# Altium schematic symbol library Centralize.SchLib: 1081 symbols (part 2 of 26)
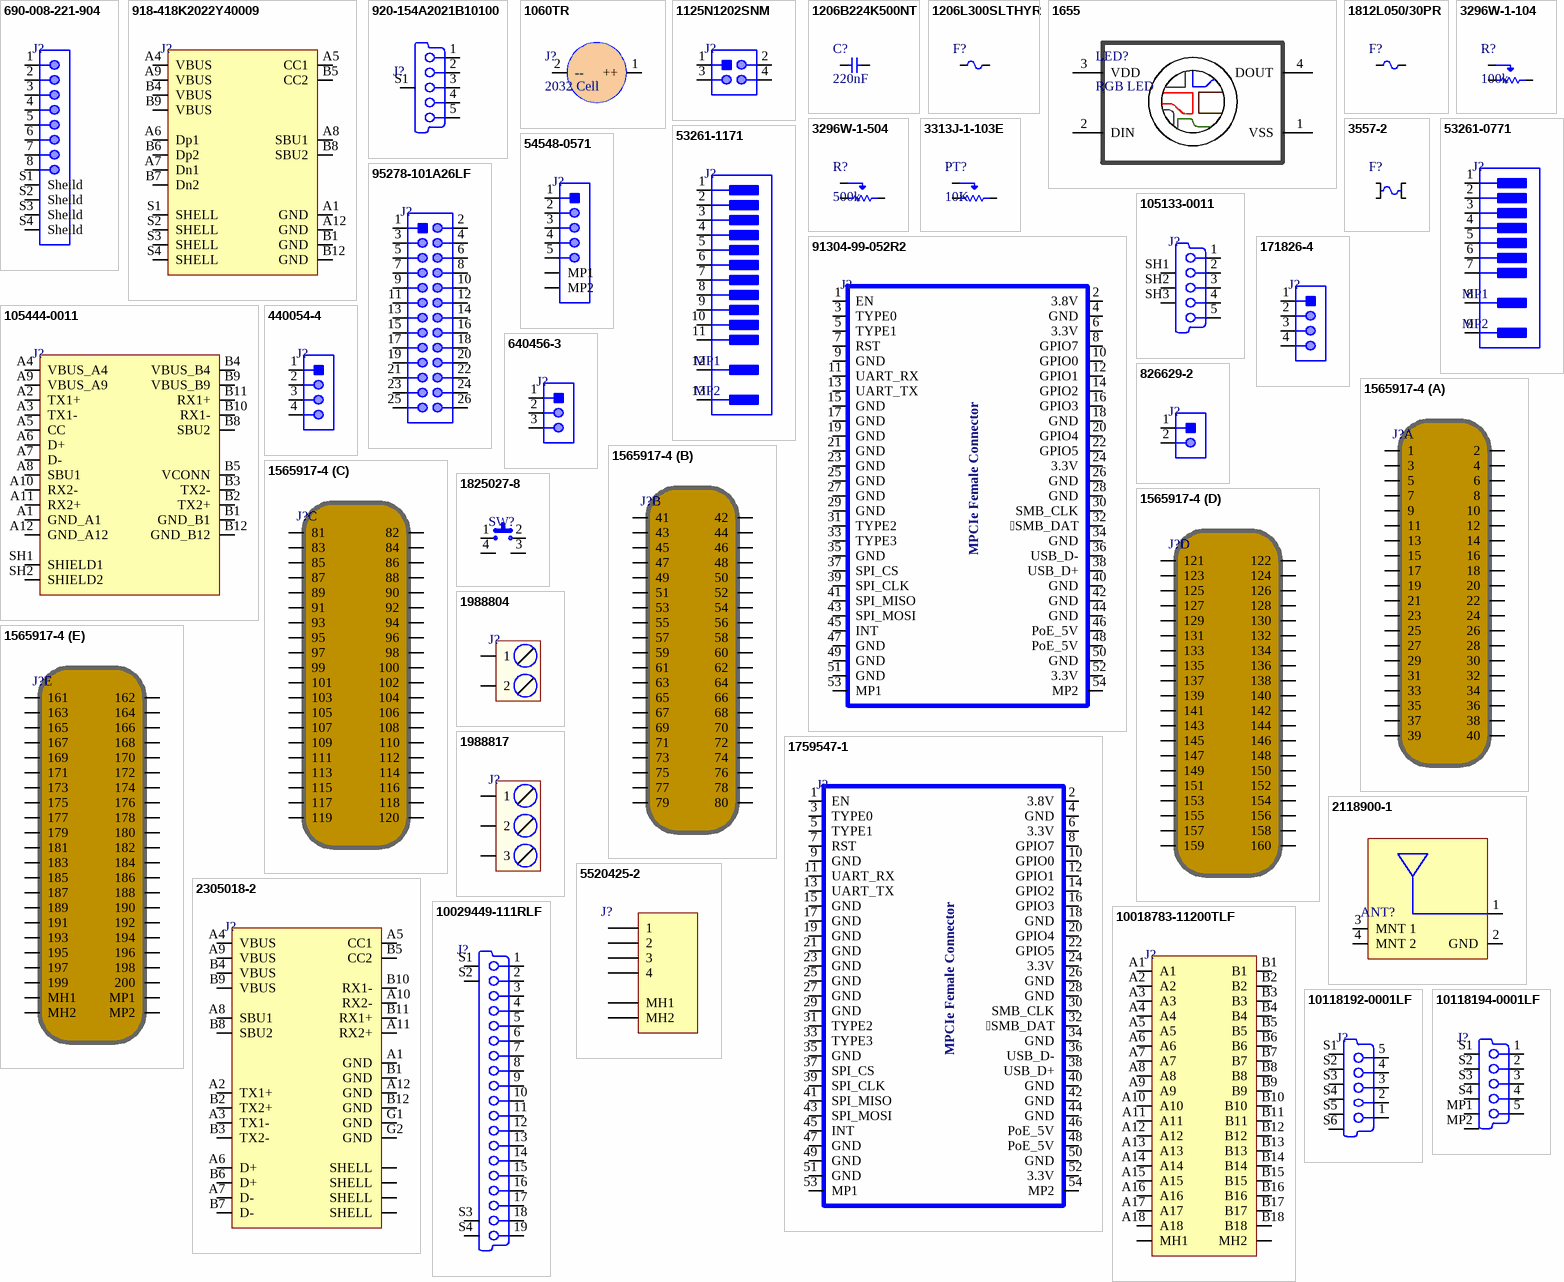
[diagram p48: symbols 690-008-221-904 to 10118194-0001LF]

## 105133-0011
designator J?
CONN RCPT USB2.0 MICRO B SMD; Manufacturer: Molex; Manufacturer Part Number: 105133-0011; Connector Type: TELECOM AND DATACOM CONNECTOR; Option: General Purpose; Contact Resistance: 30mR; Contact Style: USB; Dielectric Withstanding Voltage (AC): 140V; Durability: 10000Cycles; Empty Shell: No; Insulation Resistance: 1GR; Number Of Connectors: 1; PCB Contact Pattern: RECTANGULAR; Polarization Key: POLARIZED HOUSING; Rated Current (Signal): 1A; Number of Contacts: 5; Body Breadth: 0.118inch; Body Depth: 0.264inch; Body Length: 0.315inch; Mounting Option 1: LOCKING; Reference Standard: UL; Reliability: COMMERCIAL; Item Type: USB B Connector; Supplier 1: Avnet; RoHS: Yes; Category: USB Connectors; Stock 1: 12800; Pricing 1: 500=1.01170 (USD); Mounting Technology: Board; Contact Material: Copper Alloy; Contact Finish - Mating: NOT SPECIFIED; Contact Finish - Termination: Gold (Au) - with Nickel (Ni) barrier; Insulation Material: Polyethylene; Shell Finish: Tin; Shell Material: Stainless Steel; Min Operating Temperature: -30°C; Max Operating Temperature: 85°C; JESD-609 Code: e4; Contact Gender: Female; Filter Feature: No; Mixed Contacts: No; Mounting Style: STRAIGHT; Number Of PCB Rows: 1; Termination: SMD/SMT; Terminal Pitch: 0.6604mm; Flammability Rating: UL94 V-0; Reach SVHC Compliant: Yes; RoHS Compliant: Yes; DIN Conformance: No; IEC Conformance: No; MIL Conformance: No; ComponentLink1URL: https://datasheet.ciiva.com:443/pdfs/VipMasterIC/IC/MOLE/MOLE-S-A0000025294/MOLE-S-A0000025294-1.pdf?src-supplier=IHS+Markit; ComponentLink1Description: https://datasheet.ciiva.com:443/pdfs/VipMasterIC/IC/MOLE/MOLE-S-A0000025294/MOLE-S-A0000025294-1.pdf?src-supplier=IHS+Markit; ComponentLink2URL: https://datasheet.ciiva.com/29660/1051330011-sd-29660273.pdf?src-supplier=Digi-Key; ComponentLink2Description: https://datasheet.ciiva.com/29660/1051330011-sd-29660273.pdf?src-supplier=Digi-Key; ComponentLink3URL: https://datasheet.ciiva.com/15181/getdatasheetpartid-719072-15181485.pdf?src-supplier=Verical; ComponentLink3Description: https://datasheet.ciiva.com/15181/getdatasheetpartid-719072-15181485.pdf?src-supplier=Verical; Supplier Part Number 1: 105133-0011; LCSC Part Number: C586226
footprint 1051330011
pins: 1 V BUS (5V) "USB Vcc [Red]", 2 D- "USB Data - [White]", 3 D+ "USB Data + [Green]", 4 ID, 5 GND "Ground [Black]", SH1 "Shell", SH2 "Shell", SH3 "Shell"

## 105444-0011
designator J?
CONN PLUG USB3.1 TYPEC BRD EDGE; Manufacturer: Molex; Manufacturer Part Number: 105444-0011; Item Type: Type-C Connector; Supplier: Mouser; Supplier Part Number: 538-105444-0011; RoHS: Yes; Category: USB Connectors; Stock: 9840; Pricing: 1=2.88, 10=2.46, 50=2.46, 100=2.07, 1000=1.69, 10000=1.55 (USD); ComponentLink1URL: http://www.molex.com/pdm_docs/sd/1054440011_sd.pdf?src-supplier=Digi-Key; ComponentLink1Description: http://www.molex.com/pdm_docs/sd/1054440011_sd.pdf?src-supplier=Digi-Key; LCSC Part Number: C561769
footprint 1054440011
pins: A1 GND_A1, A2 TX1+, A3 TX1-, A4 VBUS_A4, A5 CC, A6 D+, A7 D-, A8 SBU1, A9 VBUS_A9, A10 RX2-, A11 RX2+, A12 GND_A12, B1 GND_B1, B2 TX2+, B3 TX2-, B4 VBUS_B4, B5 VCONN, B8 SBU2, B9 VBUS_B9, B10 RX1-, B11 RX1+, B12 GND_B12, SH1 SHIELD1, SH2 SHIELD2

## 171826-4
designator J?
CONN HEADER R/A 4POS 2.5MM; Manufacturer: TE Connectivity; Manufacturer Part Number: 171826-4; Number of Contacts: 4; Connector Type: Plug,Header,Pin; PCB Mount Retention: Without; PCB Mounting Orientation: Horizontal; Backwall/Post Interruptions: No (Without); Mating Alignment: Yes (With); Contact Current Rating: 3.5A; Plating Thickness: 0.8um; PCB Thickness: 0.063inch; Tail Length: 0.142inch; Approvals: UL; Item Type: R/A Header; Supplier 1: Digi-Key; Stock 1: 8314; Pricing 1: 1=0.65, 10=0.605, 100=0.4642, 500=0.40362, 1000=0.33298, 5000=0.29262, 10000=0.27244 (USD); Mount: Through Hole; Contact Plating: Copper,Tin; Contact Material: Brass; Color: Natural; Housing Color: Natural; Housing Material: Nylon; Contact Shape: Square; Insulation Material: Polyamide; Min Operating Temperature: -20°C; Max Operating Temperature: 95°C; Number of Rows: 1; Termination: Solder; Packaging: Bag; Package Quantity: 500; Number of Positions: 4; Orientation: Right Angle; Series: EI; Contact Type: Male Pin; Contact Retention: No (Without); Mating Retention: Yes (With); PCB Mount Alignment: No (Without); Strain Relief: No (Without); Contact Gender: Male; Current Rating: 3.5A; Length: 10mm; Width: 13.5mm; Height: 0.264inch; Pitch: 2.5mm; Contact Mating Length: 7.5mm; Depth: 13.5mm; Lead Pitch: 2.5mm; Radiation Hardening: No; Flammability Rating: UL94 V-0; RoHS Compliant: Yes; REACH SVHC: No SVHC; ComponentLink1URL: http://www.farnell.com/datasheets/1322337.pdf?src-supplier=Element14; ComponentLink1Description: http://www.farnell.com/datasheets/1322337.pdf?src-supplier=Element14; ComponentLink2URL: http://www.te.com/commerce/DocumentDelivery/DDEController?Action=srchrtrv&DocNm=171826&DocType=Customer+Drawing&DocLang=English&src-supplier=Digi-Key; ComponentLink2Description: http://www.te.com/commerce/DocumentDelivery/DDEController?Action=srchrtrv&DocNm=171826&DocType=Customer+Drawing&DocLang=English&src-supplier=Digi-Key; ComponentLink3URL: http://www.onlinecomponents.com/productFiles/mf-AMP/eng_cat_1242174_0698_10_.pdf?src-supplier=Onlinecomponents.com; ComponentLink3Description: http://www.onlinecomponents.com/productFiles/mf-AMP/eng_cat_1242174_0698_10_.pdf?src-supplier=Onlinecomponents.com; ComponentLink4URL: http://uk.rs-online.com/webdocs/0d92/0900766b80d92f49.pdf?src-supplier=RSComponents; ComponentLink4Description: http://uk.rs-online.com/webdocs/0d92/0900766b80d92f49.pdf?src-supplier=RSComponents; ComponentLink5URL: http://www.jameco.com/Jameco/Products/ProdDS/742320.pdf?src-supplier=Jameco; ComponentLink5Description: http://www.jameco.com/Jameco/Products/ProdDS/742320.pdf?src-supplier=Jameco; Supplier Part Number 1: A112643-ND; LCSC Part Number: C590635
footprint 171826-4_
pins: 1, 2, 3, 4

## 440054-4
designator J?
CONN HEADER VERT 4POS 2MM; Manufacturer: TE Connectivity; Manufacturer Part Number: 440054-4; Item Type: JST Connector; Supplier 1: Rs; RoHS: Yes; Category: Headers and Wire Housings; Stock 1: 3450; Pricing 1: 10=0.02240 (GBP); ComponentLink1URL: https://datasheet.ciiva.com/30492/0900766b80f980a5-30492744.pdf?src-supplier=Rs; ComponentLink1Description: https://datasheet.ciiva.com/30492/0900766b80f980a5-30492744.pdf?src-supplier=Rs; ComponentLink2URL: https://datasheet.ciiva.com/34397/4400544-34397340.pdf?src-supplier=Onlinecomponents.com; ComponentLink2Description: https://datasheet.ciiva.com/34397/4400544-34397340.pdf?src-supplier=Onlinecomponents.com; ComponentLink3URL: https://datasheet.ciiva.com/732/eng-cd-440054-e2-732490.pdf?src-supplier=Digi-Key; ComponentLink3Description: https://datasheet.ciiva.com/732/eng-cd-440054-e2-732490.pdf?src-supplier=Digi-Key; Supplier Part Number 1: 7202004P; LCSC Part Number: C574333
footprint 440054-4
pins: 1, 2, 3, 4

## 640456-3
designator J?
CONN HEADER VERT 3POS 2.54MM; Manufacturer: TE Connectivity; Manufacturer Part Number: 640456-3; Number of Positions: 3; Voltage Rating: 250V; Connector Type: Connector,Pin,Plug,Header; Connector System: Wire-to-Board; Contact Retention: No (Without); Contact Current Rating: 5A; PCB Mount Retention: Without; Contact Resistance: 6mR; PCB Mounting Orientation: Vertical; Gender: Male; Contact Style: Straight; Circuit Application: Signal; Mating Connector Lock: Yes (With); PCB Thickness: 0.063inch; Plating Thickness: 3.81um; Contact Post Length: 3.56mm; Tail Length: 0.14inch; Approvals: CSA; Supplier 1: RSComponents; RoHS: Yes; Category: JST Connectors; Stock 1: 8977; Pricing 1: 250=0.08100, 1000=0.07000, 5000=0.05800, 10000=0.05400 (GBP); Mount: Through Hole; Contact Plating: Tin; Housing Color: Natural; Housing Material: Polyester; Contact Material: Copper Alloy; Color: Beige,White; Contact Shape: Square; Contact Finish - Mating: TIN; Insulation Material: Thermoplastic; Insulation Color: Natural; Min Operating Temperature: -67°C; Max Operating Temperature: 221°C; Number of Rows: 1; Packaging: Bulk; Package Quantity: 5000; Termination: Solder; Number of Contacts: 3; Orientation: Straight; Max Voltage Rating (AC): 250V; Contact Gender: Male; Mating Alignment: No (Without); Mating Retention: No (Without); PCB Mount Alignment: No (Without); Sealable: No (Without); Current Rating: 5A; Strain Relief: No (Without); Backwall/Post Interruptions: No (Without); Shrouded: No (Without); Fastening Type: Friction; Voltage Rating (AC): 250V; Series: MTA-100; Contact Type: Male Pin; Panel Mount Retention: No (Without); Mounting Ears: No (Without); Length: 0.4inch; Height: 7.87mm; Pitch: 2.54mm; Depth: 5.72mm; Contact Mating Length: 7.49mm; Radiation Hardening: No; Flammability Rating: UL94 V-0; REACH SVHC: Unknown; Lead Free: Lead Free; ELV: Compliant; RoHS Compliant: Yes; ComponentLink1URL: https://datasheet.ciiva.com/11746/0900766b80027008-11746172.pdf?src-supplier=RSComponents; ComponentLink1Description: https://datasheet.ciiva.com/11746/0900766b80027008-11746172.pdf?src-supplier=RSComponents; ComponentLink2URL: https://datasheet.ciiva.com/6005/1712135-6005440.pdf?src-supplier=Farnell; ComponentLink2Description: https://datasheet.ciiva.com/6005/1712135-6005440.pdf?src-supplier=Farnell; ComponentLink3URL: https://datasheet.ciiva.com/19474/613940-19474164.pdf?src-supplier=Jameco; ComponentLink3Description: https://datasheet.ciiva.com/19474/613940-19474164.pdf?src-supplier=Jameco; ComponentLink4URL: https://datasheet.ciiva.com/16456/eng-ds-82056-mta-0608-16456886.pdf?src-supplier=Future+Electronics; ComponentLink4Description: https://datasheet.ciiva.com/16456/eng-ds-82056-mta-0608-16456886.pdf?src-supplier=Future+Electronics; ComponentLink5URL: https://datasheet.ciiva.com/14156/04384301-14156821.pdf?src-supplier=Distrelec; ComponentLink5Description: https://datasheet.ciiva.com/14156/04384301-14156821.pdf?src-supplier=Distrelec; ComponentLink6URL: https://datasheet.ciiva.com/16656/eng-ds-82056-mta-0608-16656523.pdf?src-supplier=Avnet+Europe; ComponentLink6Description: https://datasheet.ciiva.com/16656/eng-ds-82056-mta-0608-16656523.pdf?src-supplier=Avnet+Europe; ComponentLink7URL: https://datasheet.ciiva.com/30127/8852eng-ds-82056-mta-0608-30127480.pdf?src-supplier=Onlinecomponents.com; ComponentLink7Description: https://datasheet.ciiva.com/30127/8852eng-ds-82056-mta-0608-30127480.pdf?src-supplier=Onlinecomponents.com; ComponentLink8URL: https://datasheet.ciiva.com/14637/70083643-14637750.pdf?src-supplier=Allied+Electronics; ComponentLink8Description: https://datasheet.ciiva.com/14637/70083643-14637750.pdf?src-supplier=Allied+Electronics; ComponentLink9URL: https://datasheet.ciiva.com/7128/eng-ds-82056-mta-0608-7128744.pdf?src-supplier=Newark; ComponentLink9Description: https://datasheet.ciiva.com/7128/eng-ds-82056-mta-0608-7128744.pdf?src-supplier=Newark; ComponentLink10URL: https://datasheet.ciiva.com/709/eng-cd-640456-w2-709688.pdf?src-supplier=Digi-Key; ComponentLink10Description: https://datasheet.ciiva.com/709/eng-cd-640456-w2-709688.pdf?src-supplier=Digi-Key; Supplier Part Number 1: 1320361P; LCSC Part Number: C86503; Item Type: Header
footprint 640456-3_
pins: 1, 2, 3

## 826629-2
designator J?
CONN HEADER VERT 2POS 2.54MM; Manufacturer: TE Connectivity; Manufacturer Part Number: 8266292; Number of Contacts: 2; Connector Type: Plug,Header,Pin; Current Rating: 3A; Board Standoff: No (Without); High Speed Serial Data Connector: No; PCB Mount Retention: Without; Gender: Male; PCB Mounting Orientation: Vertical; Contact Post Length: 0.1259inch; Plating Thickness: 0.8um; Item Type: Male Header; Supplier 1: RSComponents; RoHS: Yes; Category: Board to Board Connectors; Mount: Straddle Mount; Contact Plating: Gold,Tin; Contact Material: Bronze; Color: Green; Housing Color: Green; Housing Material: PBT; Contact Shape: Square; Min Operating Temperature: -65°C; Max Operating Temperature: 105°C; Number of Rows: 1; Termination: Through Hole; Number of Positions: 2; Packaging: Carton; Package Quantity: 3000; Series: AMPMODU MOD II; Contact Type: Male Pin; Contact Gender: Male; Orientation: Straight; Contact Protection: No (Without); Gasket: No (Without); High Temperature Housing: No; Keyed: No; Mating Alignment: No (Without); Mating Connector Lock: No (Without); Selectively Loaded: No (Without); Stabilizers: No (Without); Strain Relief: No (Without); Length: 5.08mm; Pitch: 2.54mm; Contact Mating Length: 6.7mm; Row Spacing: 2.54mm; Depth: 2.5mm; Radiation Hardening: No; Flammability Rating: UL94 V-0; REACH SVHC: No SVHC; ELV: Compliant; Lead Free: Lead Free; ComponentLink1URL: https://datasheet.ciiva.com/11746/0900766b80d7c358-11746248.pdf?src-supplier=RSComponents; ComponentLink1Description: https://datasheet.ciiva.com/11746/0900766b80d7c358-11746248.pdf?src-supplier=RSComponents; ComponentLink2URL: https://datasheet.ciiva.com/30224/8266292-30224019.pdf?src-supplier=Onlinecomponents.com; ComponentLink2Description: https://datasheet.ciiva.com/30224/8266292-30224019.pdf?src-supplier=Onlinecomponents.com; ComponentLink3URL: https://datasheet.ciiva.com/29369/001094754-da-01-en-stiftleiste-1-reihig-0-0826629-2-29369600.pdf?src-supplier=Conrad; ComponentLink3Description: https://datasheet.ciiva.com/29369/001094754-da-01-en-stiftleiste-1-reihig-0-0826629-2-29369600.pdf?src-supplier=Conrad; ComponentLink4URL: https://datasheet.ciiva.com/6857/eng-cd-826629-aa-basefilename-6857135.pdf?src-supplier=Digi-Key; ComponentLink4Description: https://datasheet.ciiva.com/6857/eng-cd-826629-aa-basefilename-6857135.pdf?src-supplier=Digi-Key; ComponentLink5URL: https://datasheet.ciiva.com/14120/eh826629-draw-14120837.pdf?src-supplier=Distrelec; ComponentLink5Description: https://datasheet.ciiva.com/14120/eh826629-draw-14120837.pdf?src-supplier=Distrelec; Supplier Part Number 1: 1361864; LCSC Part Number: C86471
footprint HDR1X2_ (CONN HEADER VERT 2POS 2.54MM)
pins: 1, 2

## 1565917-4
designator J?
CONN SKT SODIMM 200POS R/A SMD; Manufacturer: TE Connectivity; Manufacturer Part Number: 1565917-4; Number of Contacts: 200; Memory Type: DDR2 SDRAM; PCB Mount Retention: With; Voltage Rating: 1.8V; Contact Current Rating: 500mA; Circuit Application: Power; Connector System: Cable-to-Board; Sealable: No (Without); Connector Type: Socket; Pitch: 0.6mm; Row Spacing: 0.244inch; Stack Height: 5.2mm; Item Type: SODIMM Connector; Supplier 1: Digi-Key; RoHS: Yes; Category: Memory Connectors; Stock 1: 14675; Pricing 1: 1=6.10000, 10=5.84400, 25=5.33600, 50=5.08180 (USD); Mount: Surface Mount; Number of Pins: 200; Housing Color: Black; Insulation Material: Thermoplastic; Housing Material: Thermoplastic; Contact Material: Copper Alloy; Contact Plating: Gold; Min Operating Temperature: -67°C; Max Operating Temperature: 185°C; Termination: Solder; Number of Rows: 2; Orientation: Right Angle; Number of Positions: 200; Packaging: Tape and Reel; Package Quantity: 150; Radiation Hardening: No; ELV: Compliant; Flammability Rating: UL94 V-0; REACH SVHC: Unknown; Lead Free: Lead Free; ComponentLink1URL: https://datasheet.ciiva.com/1106/1605472-1106736.pdf?src-supplier=Newark; ComponentLink1Description: https://datasheet.ciiva.com/1106/1605472-1106736.pdf?src-supplier=Newark; ComponentLink2URL: https://datasheet.ciiva.com/682/eng-cd-1565917-d2-682628.pdf?src-supplier=Digi-Key; ComponentLink2Description: https://datasheet.ciiva.com/682/eng-cd-1565917-d2-682628.pdf?src-supplier=Digi-Key; ComponentLink3URL: https://datasheet.ciiva.com/16314/1565917-4-16314005.pdf?src-supplier=Future+Electronics; ComponentLink3Description: https://datasheet.ciiva.com/16314/1565917-4-16314005.pdf?src-supplier=Future+Electronics; ComponentLink4URL: https://datasheet.ciiva.com/30082/a15659174317-30082398.pdf?src-supplier=Onlinecomponents.com; ComponentLink4Description: https://datasheet.ciiva.com/30082/a15659174317-30082398.pdf?src-supplier=Onlinecomponents.com; Supplier Part Number 1: A97498CT-ND
footprint 1565917-4_
part A pins: 1, 2, 3, 4, 5, 6, 7, 8, 9, 10, 11, 12, 13, 14, 15, 16, 17, 18, 19, 20, 21, 22, 23, 24, 25, 26, 27, 28, 29, 30, 31, 32, 33, 34, 35, 36, 37, 38, 39, 40
part B pins: 41, 42, 43, 44, 45, 46, 47, 48, 49, 50, 51, 52, 53, 54, 55, 56, 57, 58, 59, 60, 61, 62, 63, 64, 65, 66, 67, 68, 69, 70, 71, 72, 73, 74, 75, 76, 77, 78, 79, 80
part C pins: 81, 82, 83, 84, 85, 86, 87, 88, 89, 90, 91, 92, 93, 94, 95, 96, 97, 98, 99, 100, 101, 102, 103, 104, 105, 106, 107, 108, 109, 110, 111, 112, 113, 114, 115, 116, 117, 118, 119, 120
part D pins: 121, 122, 123, 124, 125, 126, 127, 128, 129, 130, 131, 132, 133, 134, 135, 136, 137, 138, 139, 140, 141, 142, 143, 144, 145, 146, 147, 148, 149, 150, 151, 152, 153, 154, 155, 156, 157, 158, 159, 160
part E pins: 161, 162, 163, 164, 165, 166, 167, 168, 169, 170, 171, 172, 173, 174, 175, 176, 177, 178, 179, 180, 181, 182, 183, 184, 185, 186, 187, 188, 189, 190, 191, 192, 193, 194, 195, 196, 197, 198, 199, 200, MH1, MH2, MP1, MP2

## 1759547-1
designator J?
CONN PCI EXP MIN FML 52POS 0.031; Manufacturer: TE Connectivity; Manufacturer Part Number: 1759547-1; Number of Positions: 52; Gender: Female; Pitch: 0.8mm; Item Type: Card Edge Connector; Supplier 1: Rs; RoHS: Yes; Category: Card Edge Connectors; Stock 1: 4385; Pricing 1: 5=1.254, 50=1.156, 125=1.044, 250=0.956 (GBP); Mounting Technology: Surface Mount; Contact Plating: Gold,Tin,Matte; Contact Material: Bronze; Housing Color: Black; Housing Material: Polymer; Color: Black; Insulation Material: Polymer; Number of Rows: 2; Package Quantity: 450; Packaging: Cut Tape; Number of Contacts: 52; Termination: Solder; Orientation: Right Angle; Series: -; Contact Type: -; Lead Free: Lead Free; RoHS Compliant: Yes; ComponentLink1URL: http://www.farnell.com/datasheets/2645681.pdf?src-supplier=Farnell; ComponentLink1Description: http://www.farnell.com/datasheets/2645681.pdf?src-supplier=Farnell; ComponentLink2URL: http://www.farnell.com/datasheets/2645681.pdf?src-supplier=Newark; ComponentLink2Description: http://www.farnell.com/datasheets/2645681.pdf?src-supplier=Newark; ComponentLink3URL: http://www.te.com/usa-en/product-1759547-1.html?src-supplier=Avnet; ComponentLink3Description: http://www.te.com/usa-en/product-1759547-1.html?src-supplier=Avnet; Supplier Part Number 1: 2175401; LCSC Part Number: C428485
footprint 1759547-1
pins: 1 EN, 2 3.8V, 3 TYPE0, 4 GND, 5 TYPE1, 6 3.3V, 7 RST, 8 GPIO7, 9 GND, 10 GPIO0, 11 UART_RX, 12 GPIO1, 13 UART_TX, 14 GPIO2, 15 GND, 16 GPIO3, 17 GND, 18 GND, 19 GND, 20 GPIO4, 21 GND, 22 GPIO5, 23 GND, 24 3.3V, 25 GND, 26 GND, 27 GND, 28 GND, 29 GND, 30 SMB_CLK, 31 TYPE2, 32 SMB_DAT, 33 TYPE3, 34 GND, 35 GND, 36 USB_D-, 37 SPI_CS, 38 USB_D+, 39 SPI_CLK, 40 GND, 41 SPI_MISO, 42 GND, 43 SPI_MOSI, 44 GND, 45 INT, 46 PoE_5V, 47 GND, 48 PoE_5V, 49 GND, 50 GND, 51 GND, 52 3.3V, 53 MP1, 54 MP2
text: MPCIe Female Connector

## 1825027-8
designator SW?
50mA Lying SPST 24V Plugin Tactile Switches ROHS; Manufacturer: TE Connectivity; Manufacturer Part Number: 1825027-8; Supplier 1: Arrow Electronics; RoHS: Yes; Category: Pushbutton Switches; Stock 1: 178529; Pricing 1: 1=0.13800, 10=0.13370, 25=0.12590, 100=0.10940, 250=0.10570, 500=0.09520, 1000=0.07320, 2500=0.07250, 5000=0.06250 (USD); ComponentLink1URL: https://datasheet.ciiva.com/30072/eng-cd-1825027-f-30072833.pdf?src-supplier=Onlinecomponents.com; ComponentLink1Description: https://datasheet.ciiva.com/30072/eng-cd-1825027-f-30072833.pdf?src-supplier=Onlinecomponents.com; ComponentLink2URL: https://datasheet.ciiva.com/16393/1825027-8-16393346.pdf?src-supplier=Future+Electronics; ComponentLink2Description: https://datasheet.ciiva.com/16393/1825027-8-16393346.pdf?src-supplier=Future+Electronics; ComponentLink3URL: https://datasheet.ciiva.com/8164/eng-cd-1825027-g4-8164921.pdf?src-supplier=Avnet; ComponentLink3Description: https://datasheet.ciiva.com/8164/eng-cd-1825027-g4-8164921.pdf?src-supplier=Avnet; Supplier Part Number 1: 1825027-8; Item Type: Tactile Switch
footprint 1825027-8
pins: 1, 2, 3, 4

## 1988804
designator J?
TERM BLOCK 2POS 45DEG 5MM PCB; Manufacturer: Phoenix Contact; Manufacturer Part Number: 1988804; Item Type: Screw terminal; Supplier: Digi-Key; Supplier Part Number: 277-1764-ND; RoHS: Yes; Category: Terminal Blocks; Stock: 4146; Pricing: 1=0.67, 10=0.638, 50=0.6098, 100=0.5932, 250=0.5544, 500=0.51004, 1000=0.47123, 2500=0.4505, 5000=0.429 (USD); ComponentLink1URL: https://datasheet.ciiva.com/26824/getdatasheetpartid-245870-26824102.pdf?src-supplier=Verical; ComponentLink1Description: https://datasheet.ciiva.com/26824/getdatasheetpartid-245870-26824102.pdf?src-supplier=Verical; ComponentLink2URL: https://datasheet.ciiva.com/16051/1988804-16051345.pdf?src-supplier=Onlinecomponents.com; ComponentLink2Description: https://datasheet.ciiva.com/16051/1988804-16051345.pdf?src-supplier=Onlinecomponents.com; ComponentLink3URL: https://datasheet.ciiva.com/823/combiconcompact5-0mmseries-823751.pdf?src-supplier=Digi-Key; ComponentLink3Description: https://datasheet.ciiva.com/823/combiconcompact5-0mmseries-823751.pdf?src-supplier=Digi-Key; LCSC Part Number: C7168402
footprint 1988804
pins: 1, 2

## 1988817
designator J?
TERM BLOCK 3POS 45DEG 5MM PCB; Manufacturer: Phoenix Contact; Manufacturer Part Number: 1988817; Item Type: Screw terminal; Supplier: Arrow Electronics; Supplier Part Number: 1988817; RoHS: Yes; Category: Terminal Blocks; Stock: 2; Pricing: 1=0.4959 (USD); ComponentLink1URL: https://datasheet.ciiva.com/16051/1988817-16051348.pdf?src-supplier=Onlinecomponents.com; ComponentLink1Description: https://datasheet.ciiva.com/16051/1988817-16051348.pdf?src-supplier=Onlinecomponents.com; ComponentLink2URL: https://datasheet.ciiva.com/823/combiconcompact5-0mmseries-823762.pdf?src-supplier=Digi-Key; ComponentLink2Description: https://datasheet.ciiva.com/823/combiconcompact5-0mmseries-823762.pdf?src-supplier=Digi-Key; ComponentLink3URL: https://datasheet.ciiva.com/29222/569647-da-01-en-printklemme-1988817-250-st-29222794.pdf?src-supplier=Conrad; ComponentLink3Description: https://datasheet.ciiva.com/29222/569647-da-01-en-printklemme-1988817-250-st-29222794.pdf?src-supplier=Conrad; LCSC Part Number: C5157934
footprint 1988817
pins: 1, 2, 3

## 2118900-1
designator ANT?
Standard GNSS Antenna Linear 50Ohm 1602MHz Surface Mount; Manufacturer: TE Connectivity; Manufacturer Part Number: 2118900-1; VSWR: 2; Number of Bands: 1; Max Power Dissipation: 3W; Supplier 1: Arrow Electronics; RoHS: Yes; Category: RF Antennas; Stock 1: 449; Pricing 1: 1=0.6707, 10=0.6495, 25=0.6314, 100=0.5857, 250=0.5691 (USD); Mounting Technology: Surface Mount; Series: -; RoHS Compliant: Yes; ComponentLink1URL: https://www.te.com/commerce/DocumentDelivery/DDEController?Action=srchrtrv&amp;DocNm=1-1773969-5-GNSS-2118900-1-ant-datasheet&amp;DocType=DS&amp;DocLang=English&src-supplier=Digi-Key; ComponentLink1Description: https://www.te.com/commerce/DocumentDelivery/DDEController?Action=srchrtrv&amp;DocNm=1-1773969-5-GNSS-2118900-1-ant-datasheet&amp;DocType=DS&amp;DocLang=English&src-supplier=Digi-Key; Supplier Part Number 1: 2118900-1; Item Type: GNSS Antenna
footprint 2118900-1
pins: 1, 2 GND (power), 3 MNT 1, 4 MNT 2

## 2305018-2
designator J?
CONN RCP USB3.1 TYPEC 24P SMD RA; Manufacturer: TE Connectivity AMP; Manufacturer Part Number: 2305018-2; Connector Type: USB; Number of Contacts: 24; Gender: Receptacle; Number of Ports: 1; Current Rating: 1.25A; Voltage Rating: 30V; Shielding: Shielded; Ratings: Waterproof; Item Type: USB C Connector; Supplier 1: Digi-Key; RoHS: Yes; Category: USB Connectors; Stock 1: 4590; Pricing 1: 1=3.00000, 10=2.87800, 25=2.63840, 50=2.51840, 100=2.39840, 250=2.09864 (USD); Mount: Surface Mount,Through Hole; Contact Plating: Gold; Insulation Color: Black; Min Operating Temperature: -40°C; Max Operating Temperature: 85°C; Packaging: Tape and Reel; Termination: Solder; Flammability Rating: UL94 V-0; RoHS Compliant: Yes; ComponentLink1URL: http://www.farnell.com/datasheets/2611889.pdf?src-supplier=Farnell; ComponentLink1Description: http://www.farnell.com/datasheets/2611889.pdf?src-supplier=Farnell; ComponentLink2URL: https://www.te.com/commerce/DocumentDelivery/DDEController?Action=srchrtrv&DocNm=2305018&DocType=Customer+Drawing&DocLang=English&src-supplier=Digi-Key; ComponentLink2Description: https://www.te.com/commerce/DocumentDelivery/DDEController?Action=srchrtrv&DocNm=2305018&DocType=Customer+Drawing&DocLang=English&src-supplier=Digi-Key; ComponentLink3URL: http://www.farnell.com/datasheets/2611889.pdf?src-supplier=Newark; ComponentLink3Description: http://www.farnell.com/datasheets/2611889.pdf?src-supplier=Newark; Supplier Part Number 1: A132569CT-ND; LCSC Part Number: C498674
footprint 2305018-2_
pins: A1 GND (power), A2 TX1+, A3 TX1-, A4 VBUS (power), A5 CC1, A6 D+, A7 D-, A8 SBU1, A9 VBUS (power), A10 RX2-, A11 RX2+, A12 GND (power), B1 GND (power), B2 TX2+, B3 TX2-, B4 VBUS (power), B5 CC2, B6 D+, B7 D-, B8 SBU2, B9 VBUS (power), B10 RX1-, B11 RX1+, B12 GND (power), G1 GND (power), G2 GND (power), S1 SHELL, S2 SHELL, S3 SHELL, S4 SHELL

## 5520425-2
designator J?
CONN MOD JACK 6P4C VERT UNSHLD; Manufacturer: TE Connectivity; Manufacturer Part Number: 5520425-2; Number of Terminals/Pins: 4; Number of Contacts: 6; Keyed: No; Element Configuration: Single; Number of Ports: 1; Gender: Female; Shielding: Unshielded; Max Voltage Rating (AC): 150V; Direction: User Selectable; PCB Mounting Orientation: Vertical; Current Rating: 1.5A; Contact Resistance: 30mR; Pitch: 2.54mm; Tail Length: 3.18mm; PCB Thickness: 1.57mm; Plating Thickness: 1.27um; Approvals: UL,CSA; Item Type: Ethernet Connector; Supplier 1: Digi-Key; RoHS: Yes; Category: Modular / Ethernet Connectors; Stock 1: 1404; Pricing 1: 1=1.77000, 10=1.60700, 25=1.50880, 40=1.44325, 176=1.37773, 352=1.24651, 528=1.14811, 1056=0.98408, 2464=0.91848 (USD); Contact Material: Bronze; Contact Plating: Gold; Housing Color: Black; Housing Material: PBT; Min Operating Temperature: -40°C; Max Operating Temperature: 70°C; Termination: Solder; Orientation: Straight; Connector Type: Jack; Number of Positions: 6; Number of Positions Loaded: 4; Package Quantity: 2816; Number of Rows: 1; Voltage Rating: 150V; Contact Gender: Female; Packaging: Tray; Length: 13.59mm; Width: 16.51mm; Depth: 16.01mm; Radiation Hardening: No; Flammability Rating: UL94 V-0; REACH SVHC: Unknown; ComponentLink1URL: https://datasheet.ciiva.com/30494/0900766b8121ec00-30494433.pdf?src-supplier=RSComponents; ComponentLink1Description: https://datasheet.ciiva.com/30494/0900766b8121ec00-30494433.pdf?src-supplier=RSComponents; ComponentLink2URL: https://datasheet.ciiva.com/685/eng-cd-5520425-d1-685288.pdf?src-supplier=Digi-Key; ComponentLink2Description: https://datasheet.ciiva.com/685/eng-cd-5520425-d1-685288.pdf?src-supplier=Digi-Key; ComponentLink3URL: https://datasheet.ciiva.com/19476/956272-19476731.pdf?src-supplier=Jameco; ComponentLink3Description: https://datasheet.ciiva.com/19476/956272-19476731.pdf?src-supplier=Jameco; ComponentLink4URL: https://datasheet.ciiva.com/30082/eng-cs-82066-mod-jacks-and-mrj21-prod-single-1107-30082071.pdf?src-supplier=Onlinecomponents.com; ComponentLink4Description: https://datasheet.ciiva.com/30082/eng-cs-82066-mod-jacks-and-mrj21-prod-single-1107-30082071.pdf?src-supplier=Onlinecomponents.com; ComponentLink5URL: https://datasheet.ciiva.com/16650/eng-cs-82066-mod-jacks-and-mrj21-prod-single-1107-16650297.pdf?src-supplier=Avnet+Europe; ComponentLink5Description: https://datasheet.ciiva.com/16650/eng-cs-82066-mod-jacks-and-mrj21-prod-single-1107-16650297.pdf?src-supplier=Avnet+Europe; ComponentLink6URL: https://datasheet.ciiva.com/8007/492544-8007818.pdf?src-supplier=Element14; ComponentLink6Description: https://datasheet.ciiva.com/8007/492544-8007818.pdf?src-supplier=Element14; ComponentLink7URL: https://datasheet.ciiva.com/3138/eng-cs-82066-mod-jacks-and-mrj21-prod-single-1107-3138668.pdf?src-supplier=Avnet; ComponentLink7Description: https://datasheet.ciiva.com/3138/eng-cs-82066-mod-jacks-and-mrj21-prod-single-1107-3138668.pdf?src-supplier=Avnet; ComponentLink8URL: https://datasheet.ciiva.com/14619/70042945-14619165.pdf?src-supplier=Allied+Electronics; ComponentLink8Description: https://datasheet.ciiva.com/14619/70042945-14619165.pdf?src-supplier=Allied+Electronics; Supplier Part Number 1: A31414-ND; LCSC Part Number: C305968
footprint 5520425-2 (CONN MOD JACK 6P4C VERT UNSHLD)
pins: 1, 2, 3, 4, MH1, MH2

## 10018783-11200TLF
designator J?
CONN PCI EXP FEMALE 36POS 0.039; Manufacturer: Amphenol ICC / FCI; Manufacturer Part Number: 10018783-11200TLF; Current Rating: 1.1A; Voltage Rating (AC): 300V; Number of Positions: 36; Insulation Resistance: 1GR; Connector Type: Cantilever; Pitch: 2mm; Board Thickness: 1.56mm; Card Thickness: 0.062inch; Item Type: Connector; Supplier 1: Digi-Key; Stock 1: 0; Pricing 1: 8400=0.19689 (USD); Mount: Through Hole; Contact Material: Copper Alloy; Contact Plating: Gold,Tin,Matte; Color: Black; Housing Color: Black; Housing Material: Nylon; Insulation Material: Nylon; Min Operating Temperature: -55°C; Max Operating Temperature: 85°C; Package Quantity: 70; Packaging: Tray; Gender: Female; Number of Rows: 2; Termination: Solder; Max Voltage Rating (AC): 300V; Orientation: Straight; Series: HPCE™; Contact Type: Cantilever; Length: 25mm; Width: 7.4mm; Lead Free: Lead Free; Flammability Rating: UL94 V-0; RoHS Compliant: Yes; ComponentLink1URL: http://portal.fciconnect.com/Comergent/fci/drawing/10018783.pdf?src-supplier=Avnet; ComponentLink1Description: http://portal.fciconnect.com/Comergent/fci/drawing/10018783.pdf?src-supplier=Avnet; ComponentLink2URL: https://cdn.amphenol-icc.com/media/wysiwyg/files/documentation/gs-12-233.pdf?src-supplier=Digi-Key; ComponentLink2Description: https://cdn.amphenol-icc.com/media/wysiwyg/files/documentation/gs-12-233.pdf?src-supplier=Digi-Key; ComponentLink3URL: http://portal.fciconnect.com/Comergent/en/US/adirect/fci?cmd=catProductDetail&showAddButton=true&productID=1001878311200TLF&src-supplier=Mouser; ComponentLink3Description: http://portal.fciconnect.com/Comergent/en/US/adirect/fci?cmd=catProductDetail&showAddButton=true&productID=1001878311200TLF&src-supplier=Mouser; Supplier Part Number 1: 609-1998-ND; LCSC Part Number: C4689032
footprint 10018783_11200TLF
pins: A1, A2, A3, A4, A5, A6, A7, A8, A9, A10, A11, A12, A13, A14, A15, A16, A17, A18, B1, B2, B3, B4, B5, B6, B7, B8, B9, B10, B11, B12, B13, B14, B15, B16, B17, B18, MH1, MH2

## 10029449-111RLF
designator J?
CONN RCPT 1.4 HDMI 19POS SMD R/A; Manufacturer: Amphenol ICC / FCI; Manufacturer Part Number: 10029449-111RLF; Item Type: HDMI Connector; Supplier 1: RSComponents; RoHS: No; Category: Audio / Video Connectors; Stock 1: 6150; Pricing 1: 1=1471.56000 (GBP); ComponentLink1URL: https://www.verical.com/server-webapp/html/getDatasheet?partID=416866&src-supplier=Verical; ComponentLink1Description: https://www.verical.com/server-webapp/html/getDatasheet?partID=416866&src-supplier=Verical; ComponentLink2URL: http://components.arrow.com/part/dataview/51683435S9285512N8314?src-supplier=Arrow+Electronics; ComponentLink2Description: http://components.arrow.com/part/dataview/51683435S9285512N8314?src-supplier=Arrow+Electronics; ComponentLink3URL: http://portal.fciconnect.com/Comergent/en/US/adirect/fci?cmd=catProductDetail&showAddButton=true&productID=10029449111RLF&src-supplier=Mouser; ComponentLink3Description: http://portal.fciconnect.com/Comergent/en/US/adirect/fci?cmd=catProductDetail&showAddButton=true&productID=10029449111RLF&src-supplier=Mouser; ComponentLink4URL: http://www.amphenol-icc.com/media/wysiwyg/files/drawing/10029449.pdf?src-supplier=Digi-Key; ComponentLink4Description: http://www.amphenol-icc.com/media/wysiwyg/files/drawing/10029449.pdf?src-supplier=Digi-Key; ComponentLink5URL: http://www.farnell.com/datasheets/2562284.pdf?src-supplier=Farnell; ComponentLink5Description: http://www.farnell.com/datasheets/2562284.pdf?src-supplier=Farnell; Supplier Part Number 1: 1822113; LCSC Part Number: C427307
footprint 10029449-111RLF
pins: 1, 2, 3, 4, 5, 6, 7, 8, 9, 10, 11, 12, 13, 14, 15, 16, 17, 18, 19, S1 Shield "Shell", S2 Shield "Shell", S3 Shield "Shell", S4 Shield "Shell"

## 10118192-0001LF
designator J?
CONN RCPT USB2.0 MICRO B SMD R/A; Manufacturer: Amphenol FCI; Manufacturer Part Number: 10118192-0001LF; Gender: Receptacle; Current Rating: 1.8A; Connector Type: USB,Receptacle; Number of Contacts: 5; Number of Ports: 1; Insulation Resistance: 1GR; Max Voltage Rating (AC): 100V; Pitch: 0.65mm; Item Type: USB Connector; Supplier 1: Digi-Key; Stock 1: 32977; Pricing 1: 1=0.43, 10=0.405, 25=0.3648, 50=0.3242, 100=0.3107, 250=0.28368, 500=0.27016 (USD); Mount: Surface Mount,Horizontal; Contact Plating: Gold; Contact Material: Copper Alloy; Color: Black; Number of Terminals: 5; Housing Material: Polymer; Min Operating Temperature: -55°C; Max Operating Temperature: 85°C; Termination: Solder; Packaging: Tape and Reel; Orientation: Right Angle; Package Quantity: 1400; Features: Shielded; Voltage Rating: 100V; USB Standard: USB 2.0; Length: 7.86mm; Depth: 5.57mm; Radiation Hardening: No; Flammability Rating: UL94 V-0; Lead Free: Lead Free; REACH SVHC: No SVHC; ComponentLink1URL: https://cdn.amphenol-icc.com/media/wysiwyg/files/documentation/datasheet/inputoutput/io_usb_micro.pdf?src-supplier=Verical; ComponentLink1Description: https://cdn.amphenol-icc.com/media/wysiwyg/files/documentation/datasheet/inputoutput/io_usb_micro.pdf?src-supplier=Verical; ComponentLink2URL: http://www.amphenol-icc.com/media/wysiwyg/files/drawing/10118192.pdf?src-supplier=Digi-Key; ComponentLink2Description: http://www.amphenol-icc.com/media/wysiwyg/files/drawing/10118192.pdf?src-supplier=Digi-Key; ComponentLink3URL: https://cdn.amphenol-icc.com/media/wysiwyg/files/documentation/datasheet/inputoutput/io_usb_micro.pdf?src-supplier=Mouser; ComponentLink3Description: https://cdn.amphenol-icc.com/media/wysiwyg/files/documentation/datasheet/inputoutput/io_usb_micro.pdf?src-supplier=Mouser; Supplier Part Number 1: 609-4613-6-ND; LCSC Part Number: C132564
footprint 10118192-0001LF_ (CONN RCPT USB2.0 MICRO B SMD R/A)
pins: 1 V BUS (5V) "USB Vcc [Red]", 2 D- "USB Data - [White]", 3 D+ "USB Data + [Green]", 4 NC "Not Connected (or joined to pin 5 via resistor)", 5 GND "Ground [Black]", S1 Shield "Shell", S2 Shield "Shell", S3 Shield "Shell", S4 Shield "Shell", S5 Shield "Shell", S6 Shield "Shell"

## 10118194-0001LF
designator J?
CONN RCPT USB2.0 MICRO B SMD R/A; Manufacturer: Amphenol FCI; Manufacturer Part Number: 10118194-0001LF; Gender: Receptacle; Current Rating: 1.8A; Connector Type: USB,Receptacle; Number of Contacts: 5; Insulation Resistance: 1GR; Number of Ports: 1; Max Voltage Rating (AC): 100V; Pitch: 0.65mm; Item Type: USB B Connector; Supplier 1: Digi-Key; Stock 1: 35943; Pricing 1: 1=0.43, 10=0.405, 25=0.3648, 50=0.3242, 100=0.3107, 250=0.28368, 500=0.27016 (USD); Mount: Surface Mount,Horizontal; Color: Black; Contact Material: Copper Alloy; Contact Plating: Gold; Number of Terminals: 5; Housing Material: Polymer; Min Operating Temperature: -55°C; Max Operating Temperature: 85°C; Package Quantity: 9600; Packaging: Tape and Reel; Termination: Solder; Orientation: Right Angle; Features: Shielded; Length: 8.05mm; Depth: 5mm; Radiation Hardening: No; Lead Free: Lead Free; Flammability Rating: UL94 V-0; ComponentLink1URL: http://www.amphenol-icc.com/media/wysiwyg/files/drawing/10118194.pdf?src-supplier=Digi-Key; ComponentLink1Description: http://www.amphenol-icc.com/media/wysiwyg/files/drawing/10118194.pdf?src-supplier=Digi-Key; ComponentLink2URL: https://cdn.amphenol-icc.com/media/wysiwyg/files/drawing/10118194.pdf?src-supplier=Mouser; ComponentLink2Description: https://cdn.amphenol-icc.com/media/wysiwyg/files/drawing/10118194.pdf?src-supplier=Mouser; ComponentLink3URL: https://cdn.amphenol-icc.com/media/wysiwyg/files/drawing/10118194.pdf?src-supplier=Verical; ComponentLink3Description: https://cdn.amphenol-icc.com/media/wysiwyg/files/drawing/10118194.pdf?src-supplier=Verical; Supplier Part Number 1: 609-4618-1-ND; LCSC Part Number: C132563
footprint 10118194-0001LF_
pins: 1 V BUS (5V) "USB Vcc [Red]", 2 D- "USB Data - [White]", 3 D+ "USB Data + [Green]", 4 NC "Not Connected (or joined to pin 5 via resistor)", 5 GND "Ground [Black]", MP1 Tab "Shell", MP2 Tab "Shell", S1 Shield "Shell", S2 Shield "Shell", S3 Shield "Shell", S4 Shield "Shell"

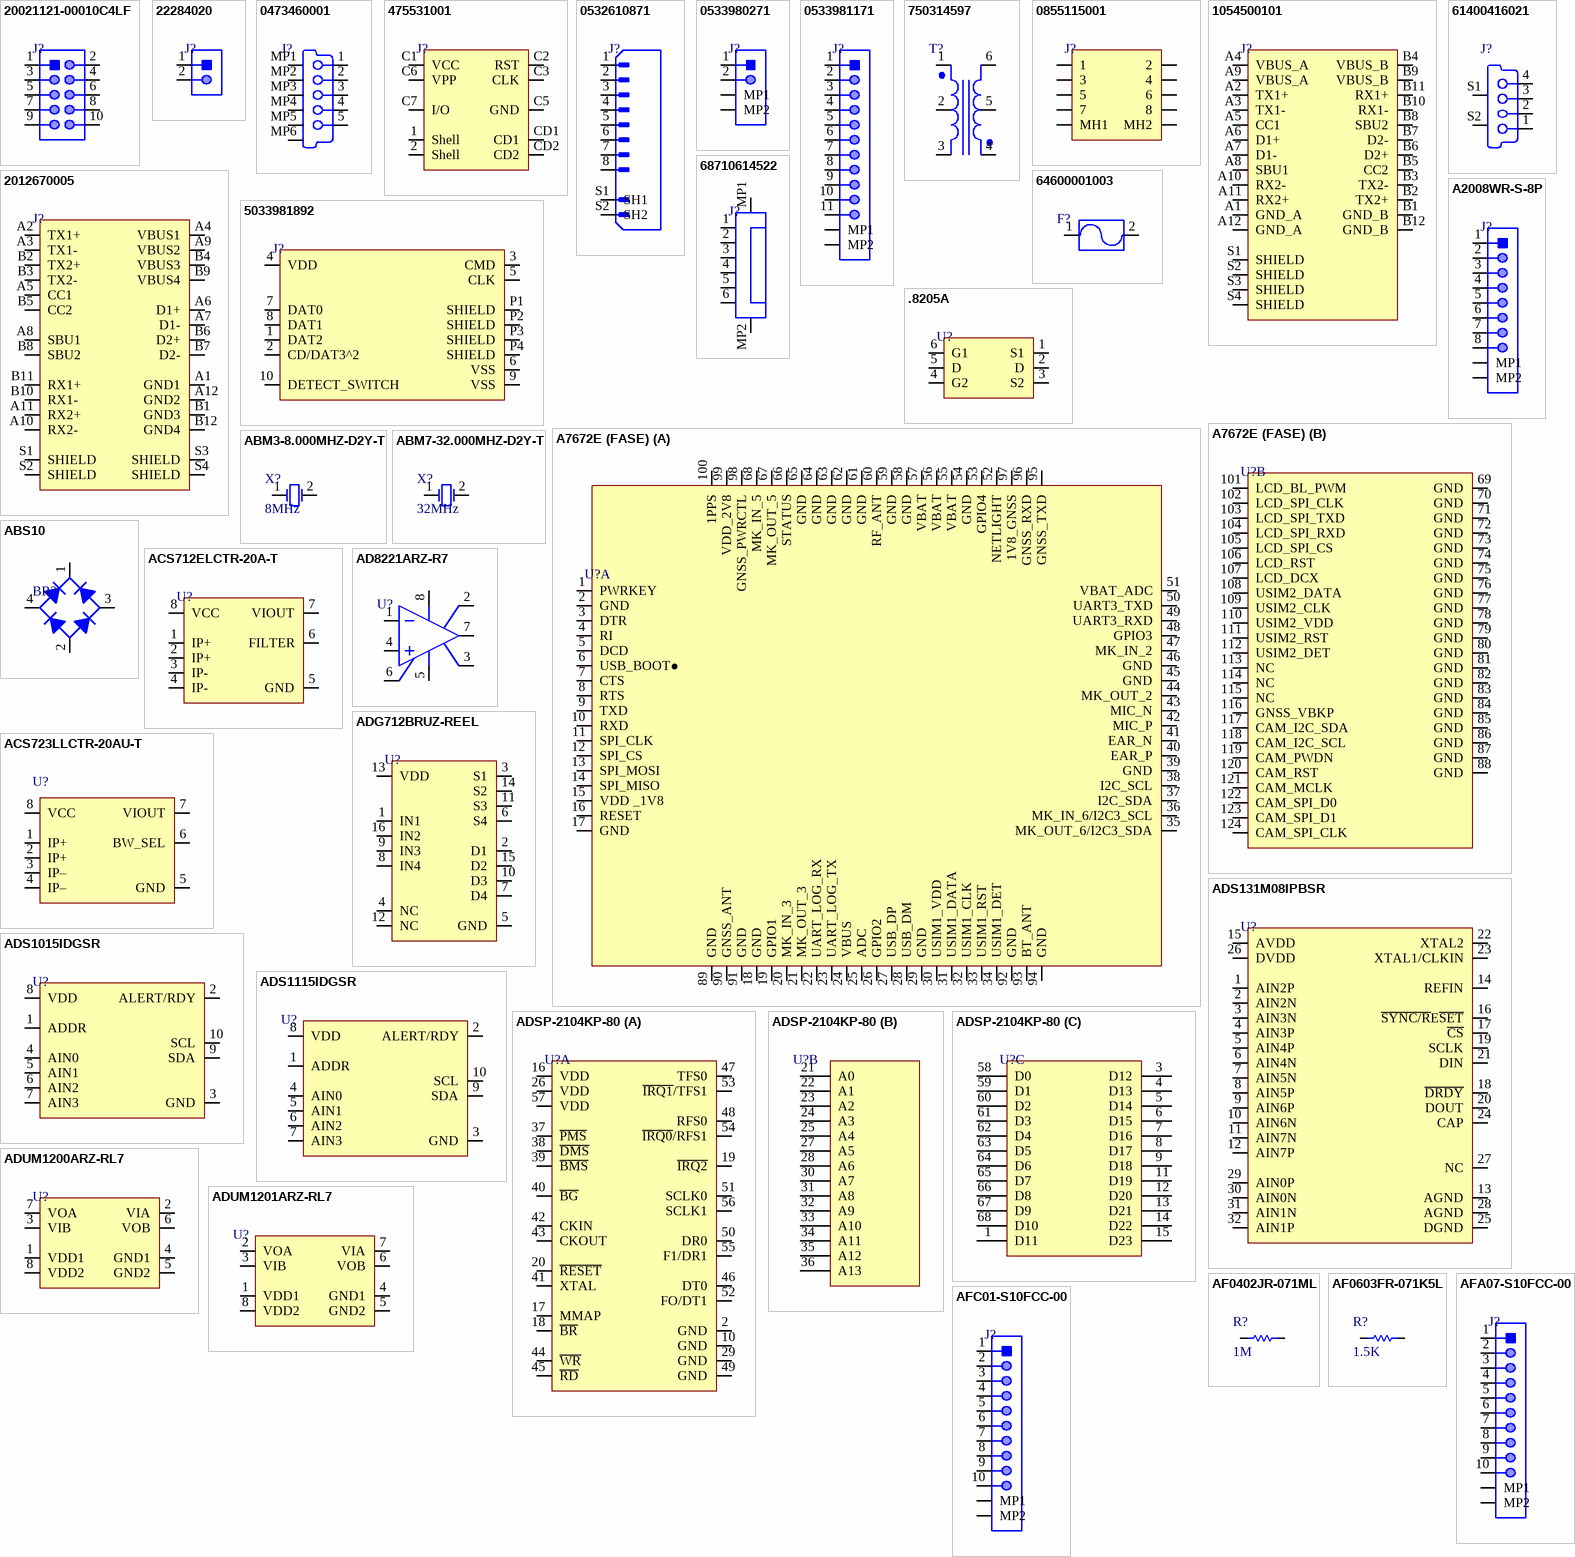
[diagram p2: symbols 20021121-00010C4LF to AFC01-S10FCC-00]

## 20021121-00010C4LF
designator J?
CONN HEADER SMD 10POS 1.27MM; Manufacturer: Amphenol FCI; Manufacturer Part Number: 20021121-00010C4LF; Number of Contacts: 10; Contact Resistance: 30mR; Current Rating: 1A; Voltage Rating: 125V; Insulation Resistance: 100MR; Gender: Male; Connector Type: Male Pin,Header; Row Spacing: 0.05inch; Stack Height: 3mm; Item Type: Jtag Male Header; Supplier 1: Digi-Key; Stock 1: 0; Pricing 1: 1=0.87, 10=0.761, 100=0.6563 (USD); Mount: Surface Mount; Contact Plating: Gold; Contact Material: Copper Alloy,Copper,Gold; Color: Black; Housing Color: Black; Housing Material: Thermoplastic; Min Operating Temperature: -40°C; Max Operating Temperature: 85°C; Number of Rows: 2; Termination: Solder; Packaging: Tape and Reel; Package Quantity: 600; Number of Positions: 10; Max Voltage Rating (AC): 125V; Orientation: Straight; Length: 6.35mm; Pitch: 1.27mm; Contact Mating Length: 0.12inch; Depth: 3.4mm; Radiation Hardening: No; REACH SVHC: No SVHC; ComponentLink1URL: https://www.verical.com/server-webapp/html/getDatasheet?partID=177140&src-supplier=Verical; ComponentLink1Description: https://www.verical.com/server-webapp/html/getDatasheet?partID=177140&src-supplier=Verical; ComponentLink2URL: http://portal.fciconnect.com/Comergent/fci/drawing/20021121.pdf?src-supplier=Avnet; ComponentLink2Description: http://portal.fciconnect.com/Comergent/fci/drawing/20021121.pdf?src-supplier=Avnet; ComponentLink3URL: https://cdn.amphenol-icc.com/media/wysiwyg/files/drawing/20021121.pdf?src-supplier=Digi-Key; ComponentLink3Description: https://cdn.amphenol-icc.com/media/wysiwyg/files/drawing/20021121.pdf?src-supplier=Digi-Key; ComponentLink4URL: http://portal.fciconnect.com/Comergent/fci/drawing/20021121.pdf?src-supplier=Avnet+Europe; ComponentLink4Description: http://portal.fciconnect.com/Comergent/fci/drawing/20021121.pdf?src-supplier=Avnet+Europe; ComponentLink5URL: https://media.digikey.com/pdf/Data%20Sheets/FCI%20PDFs/Minitek%20127_Catalog.pdf?src-supplier=Digi-Key; ComponentLink5Description: https://media.digikey.com/pdf/Data%20Sheets/FCI%20PDFs/Minitek%20127_Catalog.pdf?src-supplier=Digi-Key; ComponentLink6URL: http://portal.fciconnect.com/Comergent//fci/drawing/20021121.pdf?src-supplier=Mouser; ComponentLink6Description: http://portal.fciconnect.com/Comergent//fci/drawing/20021121.pdf?src-supplier=Mouser; Supplier Part Number 1: 609-3695-6-ND; LCSC Part Number: C150517
footprint 20021121-00010C4LF_
pins: 1, 2, 3, 4, 5, 6, 7, 8, 9, 10

## 22284020
designator J?
KK 254 Breakaway Header, Vertical, 2 Circuits, Tin (Sn) Plating, Mating Pin Length 6.09mm; Manufacturer: Molex; Number of Contacts: 2; Contact Resistance: 20mR; Max Voltage Rating (DC): 250V; Current Rating: 4A; Gender: Male; Connector Type: Male Pin; Pitch: 2.54mm; Glow Wire Compliant: Non-compliant; Item Type: Male Header; Supplier 1: Rs; Manufacturer Part Number: 22-28-4020; RoHS: Yes; Category: Headers and Wire Housings; Stock 1: 29550; Pricing 1: 50=0.06100, 150=0.05600, 250=0.05200, 500=0.04900 (GBP); Mount: Through Hole; Contact Plating: Tin; Color: Black; Contact Material: Brass,Bronze; Housing Color: Black; Housing Material: Nylon; Min Operating Temperature: 0°C; Max Operating Temperature: 75°C; Number of Rows: 1; Termination: Solder; Package Quantity: 1; Packaging: Bulk; Voltage Rating: 250V; Number of Positions: 2; Orientation: Straight; Number of Circuits: 2; Series: KK® 42375; Contact Type: Male Pin; Voltage Rating (DC): 250V; Max Voltage Rating (AC): 250V; Contact Mating Length: 0.24inch; Depth: 2.49mm; Radiation Hardening: No; Lead Free: Lead Free; RoHS Compliant: Yes; Flammability Rating: UL94 V-0; ComponentLink1URL: https://datasheet.ciiva.com/1433/1596842-1433683.pdf?src-supplier=Element14; ComponentLink1Description: https://datasheet.ciiva.com/1433/1596842-1433683.pdf?src-supplier=Element14; ComponentLink2URL: https://datasheet.ciiva.com/5157/0022284020-pcb-headers-228358-5157523.pdf?src-supplier=Mouser; ComponentLink2Description: https://datasheet.ciiva.com/5157/0022284020-pcb-headers-228358-5157523.pdf?src-supplier=Mouser; ComponentLink3URL: https://datasheet.ciiva.com/30153/214440022284020-pcb-headers-30153261.pdf?src-supplier=Onlinecomponents.com; ComponentLink3Description: https://datasheet.ciiva.com/30153/214440022284020-pcb-headers-30153261.pdf?src-supplier=Onlinecomponents.com; ComponentLink4URL: https://datasheet.ciiva.com/15217/getdatasheetpartid-127875-15217702.pdf?src-supplier=Verical; ComponentLink4Description: https://datasheet.ciiva.com/15217/getdatasheetpartid-127875-15217702.pdf?src-supplier=Verical; ComponentLink5URL: https://datasheet.ciiva.com/10088/0022284020-pcb-headers-10088332.pdf?src-supplier=Avnet; ComponentLink5Description: https://datasheet.ciiva.com/10088/0022284020-pcb-headers-10088332.pdf?src-supplier=Avnet; Supplier Part Number 1: 8967620; LCSC Part Number: C234182
footprint HDR1X2_ (CONN HEADER VERT 2POS 2.54MM)
pins: 1, 2

## 0473460001
designator J?
Micro-USB B Receptacle with Flange, Bottom Mount, Surface Mount, Lead-Free; Manufacturer: Molex; Manufacturer Part Number: 47346-0001; Item Type: USB B Connector; Supplier 1: Digi-Key; RoHS: Yes; Category: Headers and Wire Housings; Stock 1: 9395; Pricing 1: 1=1.10000, 10=0.91200, 100=0.75980, 1000=0.60782 (USD); ComponentLink1URL: https://datasheet.ciiva.com/30075/304740473460001-io-nectors-30075527.pdf?src-supplier=Onlinecomponents.com; ComponentLink1Description: https://datasheet.ciiva.com/30075/304740473460001-io-nectors-30075527.pdf?src-supplier=Onlinecomponents.com; ComponentLink2URL: https://datasheet.ciiva.com/22654/1630785-22654942.pdf?src-supplier=Element14; ComponentLink2Description: https://datasheet.ciiva.com/22654/1630785-22654942.pdf?src-supplier=Element14; ComponentLink3URL: https://datasheet.ciiva.com/16148/1700180473460001-io-nectors-16148917.pdf?src-supplier=Onlinecomponents.com; ComponentLink3Description: https://datasheet.ciiva.com/16148/1700180473460001-io-nectors-16148917.pdf?src-supplier=Onlinecomponents.com; ComponentLink4URL: https://datasheet.ciiva.com/11731/0900766b80dfe0a7-11731298.pdf?src-supplier=RSComponents; ComponentLink4Description: https://datasheet.ciiva.com/11731/0900766b80dfe0a7-11731298.pdf?src-supplier=RSComponents; ComponentLink5URL: https://datasheet.ciiva.com/1098/1698067-1098476.pdf?src-supplier=Element14; ComponentLink5Description: https://datasheet.ciiva.com/1098/1698067-1098476.pdf?src-supplier=Element14; ComponentLink6URL: https://datasheet.ciiva.com/4598/0473460001-io-connectors-146446-4598841.pdf?src-supplier=Mouser; ComponentLink6Description: https://datasheet.ciiva.com/4598/0473460001-io-connectors-146446-4598841.pdf?src-supplier=Mouser; ComponentLink7URL: https://datasheet.ciiva.com/28504/0473460001-io-connectors-28504587.pdf?src-supplier=Element14; ComponentLink7Description: https://datasheet.ciiva.com/28504/0473460001-io-connectors-28504587.pdf?src-supplier=Element14; ComponentLink8URL: https://datasheet.ciiva.com/46390/1681853-46390956.pdf?src-supplier=Element14; ComponentLink8Description: https://datasheet.ciiva.com/46390/1681853-46390956.pdf?src-supplier=Element14; ComponentLink9URL: https://datasheet.ciiva.com/16986/70266948-16986683.pdf?src-supplier=Allied+Electronics; ComponentLink9Description: https://datasheet.ciiva.com/16986/70266948-16986683.pdf?src-supplier=Allied+Electronics; Supplier Part Number 1: WM17141DKR-ND
footprint 0473460001_
pins: 1 V BUS (5V) "USB Vcc [Red]", 2 D- "USB Data - [White]", 3 D+ "USB Data + [Green]", 4 ID "Not Connected (or joined to pin 5 via resistor)", 5 GND "Ground [Black]", MP1 Tab "Shell", MP2 Tab "Shell", MP3 Tab "Shell", MP4 Tab "Shell", MP5 Tab "Shell", MP6 Tab "Shell"

## 475531001
designator J?
CONN SIM CARD PUSH-PUSH R/A SMD; Manufacturer: Molex; Manufacturer Part Number: 47553-1001; Number of Contacts: 6; Current Rating: 500mA; Voltage Rating (DC): 50V; Gender: Female; Pitch: 2.54mm; Item Type: SIM Card Connector; Supplier 1: Mouser; RoHS: Yes; Category: Memory Connectors; Stock 1: 16316; Pricing 1: 1=3.44000, 10=3.03000, 50=3.03000, 100=2.40000, 1000=2.36000, 10000=1.95000 (USD); Mounting Technology: Surface Mount; Contact Material: Copper,Copper Alloy; Contact Plating: Gold; Housing Material: Thermoplastic; Material: Thermoplastic; Min Operating Temperature: -30°C; Max Operating Temperature: 85°C; Packaging: Tape and Reel; Number of Rows: 1; Orientation: Horizontal; Termination: SMD/SMT; Series: 47553; Package Quantity: 1200; Number of Circuits: 6; Length: 26.5mm; Width: 19.35mm; Depth: 2.34mm; Radiation Hardening: No; RoHS Compliant: Yes; Reach SVHC Compliant: Unknown; ComponentLink1URL: https://datasheet.ciiva.com/1100/301162-1100082.pdf?src-supplier=Element14; ComponentLink1Description: https://datasheet.ciiva.com/1100/301162-1100082.pdf?src-supplier=Element14; ComponentLink2URL: https://datasheet.ciiva.com/4581/0475531001-memory-card-socket-146294-4581284.pdf?src-supplier=Mouser; ComponentLink2Description: https://datasheet.ciiva.com/4581/0475531001-memory-card-socket-146294-4581284.pdf?src-supplier=Mouser; ComponentLink3URL: https://datasheet.ciiva.com/9464/0475531001-memory-card-socket-9464188.pdf?src-supplier=Avnet; ComponentLink3Description: https://datasheet.ciiva.com/9464/0475531001-memory-card-socket-9464188.pdf?src-supplier=Avnet; ComponentLink4URL: https://datasheet.ciiva.com/16655/0475531001-memory-card-socket-16655597.pdf?; ComponentLink4Description: https://datasheet.ciiva.com/16655/0475531001-memory-card-socket-16655597.pdf?; Supplier Part Number 1: 538-47553-1001; LCSC Part Number: C293570
footprint 475531001
pins: 1 Shell, 2 Shell, C1 VCC, C2 RST, C3 CLK, C5 GND, C6 VPP, C7 I/O, CD1, CD2

## 0532610871
designator J?
CONN HEADER SMD R/A 8POS 1.25MM; Manufacturer: Molex; Manufacturer Part Number: 53261-0871; Contact Resistance: 20mR; Current Rating: 1A; Voltage Rating: 125V; Number of Positions: 8; Insulation Resistance: 100MR; Gender: Male; Glow Wire Compliant: Non-compliant; Item Type: R/A Male Blade Header; Supplier 1: Mouser; RoHS: Yes; Category: Headers and Wire Housings; Stock 1: 34151; Pricing 1: 1=0.89, 10=0.735, 50=0.735, 100=0.609, 1000=0.482, 10000=0.393 (USD); Mounting Technology: Surface Mount; Contact Material: Bronze,Brass,Tin; Contact Plating: Tin; Color: Natural; Housing Material: Nylon; Contact Shape: Rectangular; Contact Finish - Mating: TIN; Insulation Material: Nylon; Insulation Color: Natural; Housing Color: Natural; Min Operating Temperature: -40°C; Max Operating Temperature: 85°C; Number of Rows: 1; Voltage Rating (AC): 125V; Packaging: Tape and Reel; Package Quantity: 1000; Termination: Solder; Number of Contacts: 8; Working Voltage: 125V; Orientation: Right Angle; Number of Circuits: 8; Voltage Rating (DC): 125V; Connector Type: Header; Fastening Type: Detent; Series: PicoBlade; Contact Type: Male Blade; Lead Pitch: 1.25mm; Pitch: 1.25mm; Depth: 5.2mm; Radiation Hardening: No; Lead Free: Lead Free; Flammability Rating: UL94 V-0; RoHS Compliant: Yes; Reach SVHC Compliant: Unknown; Supplier Part Number 1: 538-53261-0871; LCSC Part Number: *
footprint 53261-0871
pins: 1, 2, 3, 4, 5, 6, 7, 8, S1 SH1, S2 SH2

## 0533980271
designator J?
CONN HEADER SMD 2POS 1.25MM; Manufacturer: Molex; Manufacturer Part Number: 53398-0271; Current Rating: 1A; Voltage Rating (AC): 125V; Contact Resistance: 20mR; Number of Positions: 2; Insulation Resistance: 100MR; Gender: Male; Glow Wire Compliant: Non-compliant; Item Type: R/A JST Connector; Supplier 1: Mouser; RoHS: Yes; Category: Headers and Wire Housings; Stock 1: 64394; Pricing 1: 1=0.62000, 10=0.52100, 50=0.52100, 100=0.40500, 1000=0.31000, 10000=0.25800 (USD); Mounting Technology: Surface Mount; Contact Material: Bronze,Brass,Tin; Contact Plating: Tin; Color: Natural; Housing Color: Natural; Housing Material: Nylon; Min Operating Temperature: -40°C; Max Operating Temperature: 85°C; Number of Rows: 1; Packaging: Tape and Reel; Package Quantity: 1000; Voltage Rating: 125V; Termination: Solder; Number of Contacts: 2; Working Voltage: 125V; Orientation: Vertical; Number of Circuits: 2; Voltage Rating (DC): 125V; Series: PicoBlade; Contact Type: Blade Pin; Pitch: 1.25mm; Radiation Hardening: No; Lead Free: Lead Free; Flammability Rating: UL94 V-0; RoHS Compliant: Yes; Reach SVHC Compliant: Unknown; ComponentLink1URL: https://datasheet.ciiva.com/30229/225140533980271-pcb-headers-30229043.pdf?src-supplier=Onlinecomponents.com; ComponentLink1Description: https://datasheet.ciiva.com/30229/225140533980271-pcb-headers-30229043.pdf?src-supplier=Onlinecomponents.com; Supplier Part Number 1: 538-53398-0271; LCSC Part Number: C122410
footprint 0533980271
pins: 1, 2, MP1, MP2

## 0533981171
designator J?
CONN HEADER SMD 11POS 1.25MM; Manufacturer: Molex; Manufacturer Part Number: 53398-1171; Supplier: Mouser; Supplier Part Number: 538-53398-1171; RoHS: Yes; Category: Headers and Wire Housings; Stock: 2367; Pricing: 1=1.46, 10=1.2, 50=1.2, 100=0.998, 1000=0.798, 10000=0.648 (USD)
footprint 0533981171
pins: 1, 2, 3, 4, 5, 6, 7, 8, 9, 10, 11, MP1, MP2